# Altium footprint library PCB1.PcbLib: 53 footprints (part 3 of 4)
Each footprint in its own frame and in the unit in brackets; x right, y up, seen from the top. Pads: shape width x height; smd on the part's side, far side on the other; paste and mask are expansions set on the pad; w line width, h text height; cw(c..) or ccw(c..) is an arc to the next point about the centre after c.
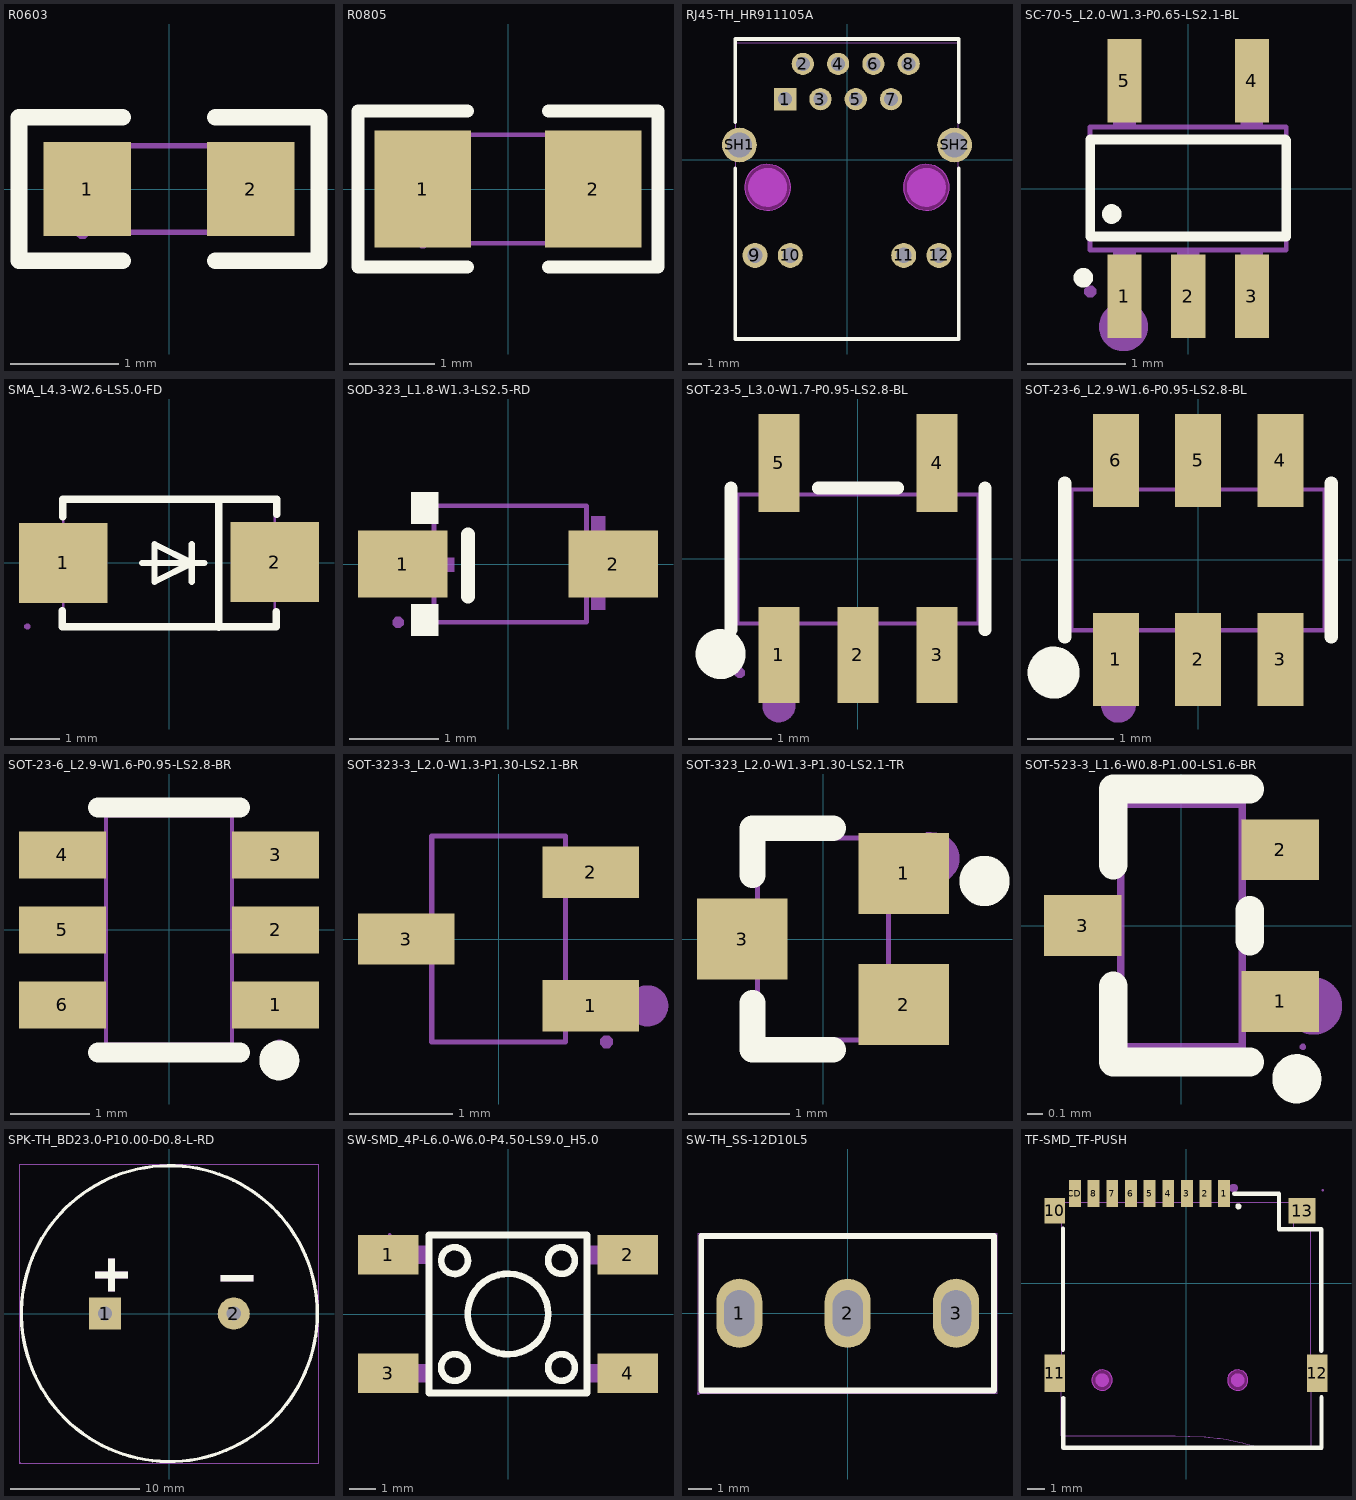
[diagram p2: the footprints below, top view; thin cyan lines are the x and y axes]

## R0603 [mm]
pads (2):
  rect 0.806x0.864 smd paste-100 mask+0.051: 1(-0.753,0) 2(0.753,0)
Top Overlay:
  lines w0.152: -0.426,-0.661 -1.385,-0.661 -1.385,0.661 -0.426,0.661 ; 0.426,-0.661 1.385,-0.661 1.385,0.661 0.426,0.661
Top Paste:
  region: -1.195,-0.45 -0.395,-0.45 -0.345,-0.4 -0.345,-0.172 -0.715,-0.172 -0.715,0.158 -0.345,0.158 -0.345,0.4 -0.395,0.45 -1.195,0.45 -1.245,0.4 -1.245,-0.4
  region: 1.195,0.45 0.395,0.45 0.345,0.4 0.345,0.172 0.715,0.172 0.715,-0.158 0.345,-0.158 0.345,-0.4 0.395,-0.45 1.195,-0.45 1.245,-0.4 1.245,0.4
Mechanical 7:
  lines w0.051: -0.8,-0.4 0.8,-0.4 0.8,0.4 -0.8,0.4 -0.8,-0.4
Mechanical 8:
  region: -0.74,-0.4 -0.74,-0.425 -0.775,-0.46 -0.825,-0.46 -0.86,-0.425 -0.86,-0.4 -0.86,-0.375 -0.825,-0.34 -0.775,-0.34 -0.74,-0.375 -0.74,-0.4
Mechanical 9:
  region: 0.8,-0.4 0.8,0.4 0.5,0.4 0.5,-0.4
  region: -0.8,-0.4 -0.8,0.4 -0.5,0.4 -0.5,-0.4
3D body "C2933128.step": height 0.44, standoff -0.01, extent -0.81,-0.41 0.81,0.4

## R0805 [mm]
pads (2):
  rect 1.133x1.377 smd paste-100 mask+0.051: 1(-1,0) 2(1,0)
Top Overlay:
  lines w0.152: -0.476,-0.917 -1.761,-0.917 -1.761,0.917 -0.476,0.917 ; 0.476,-0.917 1.761,-0.917 1.761,0.917 0.476,0.917
Top Paste:
  region: -1.7,-0.64 -1.7,0.64 -1.65,0.69 -0.5,0.69 -0.45,0.64 -0.445,0.23 -0.895,0.23 -0.895,-0.22 -0.455,-0.22 -0.45,-0.64 -0.5,-0.69 -1.65,-0.69
  region: 0.45,-0.64 0.45,-0.22 0.895,-0.22 0.895,0.23 0.455,0.23 0.45,0.64 0.5,0.69 1.65,0.69 1.7,0.64 1.7,-0.64 1.65,-0.69 0.5,-0.69
Mechanical 7:
  lines w0.051: -1,-0.637 -1,0.637 1,0.637 1,-0.637 -1,-0.637
Mechanical 8:
  region: -0.94,-0.638 -0.94,-0.662 -0.975,-0.698 -1.025,-0.698 -1.06,-0.662 -1.06,-0.638 -1.06,-0.613 -1.025,-0.578 -0.975,-0.578 -0.94,-0.613 -0.94,-0.638
Mechanical 9:
  region: -1,-0.637 -1,0.637 -0.6,0.637 -0.6,-0.637
  region: 1,-0.637 1,0.637 0.6,0.637 0.6,-0.637
3D body "C51934133.step": height 0.61, standoff 0, extent -0.96,-0.632 1.04,0.669

## RJ45-TH_HR911105A [mm]
pads (14):
  rect 1.6x1.6 hole 1: 1(-4.45,4.355)
  round 1.6 hole 1: 2(-3.18,6.895) 3(-1.91,4.355) 4(-0.64,6.895) 5(0.63,4.355) 6(1.9,6.895) 7(3.17,4.355) 8(4.44,6.895)
  round 1.8 hole 1.1: 9(-6.625,-6.895) 10(-4.085,-6.895) 11(4.085,-6.895) 12(6.625,-6.895)
  round 2.5 hole 1.8: SH1(-7.745,1.055) SH2(7.745,1.055)
Top Overlay:
  lines w0.254: -8.05,-0.615 -8.05,-12.915 8.05,-12.915 8.05,-0.615 ; -8.05,2.685 -8.05,8.685 8.05,8.685 ; 8.05,2.685 8.05,8.685
Keep-Out Layer:
  board cut-out: -7.365,-1.995 -7.365,-1.833 -7.302,-1.514 -7.177,-1.213 -6.997,-0.943 -6.767,-0.713 -6.497,-0.533 -6.196,-0.408 -5.878,-0.345 -5.552,-0.345 -5.234,-0.408 -4.933,-0.533 -4.663,-0.713 -4.433,-0.943 -4.253,-1.213 -4.128,-1.514 -4.065,-1.833 -4.065,-1.995 -4.065,-2.158 -4.128,-2.476 -4.253,-2.777 -4.433,-3.047 -4.663,-3.277 -4.933,-3.457 -5.234,-3.582 -5.552,-3.645 -5.878,-3.645 -6.196,-3.582 -6.497,-3.457 -6.767,-3.277 -6.997,-3.047 -7.177,-2.777 -7.302,-2.476 -7.365,-2.158 -7.365,-1.995
  board cut-out: 4.065,-1.995 4.065,-1.833 4.128,-1.514 4.253,-1.213 4.433,-0.943 4.663,-0.713 4.933,-0.533 5.234,-0.408 5.552,-0.345 5.878,-0.345 6.196,-0.408 6.497,-0.533 6.767,-0.713 6.997,-0.943 7.177,-1.213 7.302,-1.514 7.365,-1.833 7.365,-1.995 7.365,-2.158 7.302,-2.476 7.177,-2.777 6.997,-3.047 6.767,-3.277 6.497,-3.457 6.196,-3.582 5.878,-3.645 5.552,-3.645 5.234,-3.582 4.933,-3.457 4.663,-3.277 4.433,-3.047 4.253,-2.777 4.128,-2.476 4.065,-2.158 4.065,-1.995
Keep-Out Layer:
  drawing of 6 lines, arcs and shapes, not listed
Mechanical 1:
  circle w0.003: c-5.715,-1.995 r1.65
  circle w0.003: c5.715,-1.995 r1.65
Mechanical 6:
  circle w0.2: c-5.03,4.96 r0.1
  circle w1.4: c-5.715,-1.995 r0.7
  circle w1.4: c5.715,-1.995 r0.7
Mechanical 7:
  lines w0.051: -8.02,-12.895 -8.02,8.405 8.02,8.405 8.02,-12.895 -8.02,-12.895
Mechanical 8:
  region: -8.08,8.405 -8.08,8.43 -8.045,8.465 -7.995,8.465 -7.96,8.43 -7.96,8.405 -7.96,8.38 -7.995,8.345 -8.045,8.345 -8.08,8.38 -8.08,8.405
Mechanical 9:
  region: 4.14,7.045 4.74,7.045 4.74,6.745 4.14,6.745
  region: 2.87,4.505 3.47,4.505 3.47,4.205 2.87,4.205
  region: 1.6,7.045 2.2,7.045 2.2,6.745 1.6,6.745
  region: 0.33,4.505 0.93,4.505 0.93,4.205 0.33,4.205
  region: -0.94,7.045 -0.34,7.045 -0.34,6.745 -0.94,6.745
  region: -2.21,4.505 -1.61,4.505 -1.61,4.205 -2.21,4.205
  region: -3.48,7.045 -2.88,7.045 -2.88,6.745 -3.48,6.745
  region: -4.75,4.505 -4.15,4.505 -4.15,4.205 -4.75,4.205
  region: -6.925,-6.745 -6.325,-6.745 -6.325,-7.045 -6.925,-7.045
  region: -4.385,-6.745 -3.785,-6.745 -3.785,-7.045 -4.385,-7.045
  region: 3.785,-6.745 4.385,-6.745 4.385,-7.045 3.785,-7.045
  region: 6.325,-6.745 6.925,-6.745 6.925,-7.045 6.325,-7.045
  region: 7.72,0.455 7.72,1.655 8.02,1.655 8.02,0.455
  region: -8.02,0.455 -8.02,1.655 -7.72,1.655 -7.72,0.455
3D body "C12074.step": height 13.84, standoff -3.3, extent -7.867,-13.086 8.001,8.514

## SC-70-5_L2.0-W1.3-P0.65-LS2.1-BL [mm]
pads (5):
  rect 0.35x0.85 smd paste+0 mask+0.05: 1(-0.65,-1.1) 2(0,-1.1) 3(0.65,-1.1) 4(0.65,1.1) 5(-0.65,1.1)
Top Overlay:
  circle w0.1: c-0.78,-0.26 r0.05
  circle w0.1: c-1.07,-0.91 r0.05
  lines w0.1: -1,-0.49 -1,0.5 0.99,0.5 1,0.49 1,-0.49 -1,-0.49
Mechanical 6:
  circle w0.25: c-0.66,-1.41 r0.125
Mechanical 7:
  lines w0.051: -1,-0.625 -1,0.625 1,0.625 1,-0.625 -1,-0.625
Mechanical 8:
  region: -0.94,-1.05 -0.94,-1.075 -0.975,-1.11 -1.025,-1.11 -1.06,-1.075 -1.06,-1.05 -1.06,-1.025 -1.025,-0.99 -0.975,-0.99 -0.94,-1.025 -0.94,-1.05
Mechanical 9:
  region: 0.537,-1.05 0.537,-0.69 0.762,-0.69 0.762,-1.05
  region: -0.113,-1.05 -0.113,-0.69 0.112,-0.69 0.112,-1.05
  region: -0.763,-1.05 -0.763,-0.69 -0.538,-0.69 -0.538,-1.05
  region: 0.537,0.69 0.537,1.05 0.762,1.05 0.762,0.69
  region: -0.763,0.69 -0.763,1.05 -0.538,1.05 -0.538,0.69
Mechanical 10:
  region: 0.537,-0.7 0.537,-0.615 0.762,-0.615 0.762,-0.7
  region: -0.113,-0.7 -0.113,-0.615 0.112,-0.615 0.112,-0.7
  region: -0.763,-0.7 -0.763,-0.615 -0.538,-0.615 -0.538,-0.7
  region: 0.537,0.615 0.537,0.7 0.762,0.7 0.762,0.615
  region: -0.763,0.615 -0.763,0.7 -0.538,0.7 -0.538,0.615
3D body "C193688.step": height 0.88, standoff -0.07, extent -1,-1.1 1,1.1

## SMA_L4.3-W2.6-LS5.0-FD [mm]
pads (2):
  rect 1.8x1.62 smd: 1(-2.15,-0.009) 2(2.15,0.009)
Top Overlay:
  lines w0.127: -0.551,-0.01 0.719,-0.01 ; 0.465,-0.391 0.465,-0.01 ; 0.465,0.371 0.465,-0.01 ; 0.465,-0.01 -0.297,-0.391 -0.297,-0.01 -0.297,0.371 0.465,-0.01
  lines w0.152: -2.17,-0.979 -2.17,-1.309 2.177,-1.309 2.177,-0.998 ; -2.16,0.93 -2.16,1.288 2.186,1.288 2.186,0.977 ; 1.007,-1.321 1.007,1.276
Mechanical 6:
  region: -2.142,0.644 -2.142,-0.644 -1.949,-0.644 -1.949,0.644
  region: -2.432,0.097 -2.432,-0.097 -1.659,-0.097 -1.659,0.097
  region: 2.432,0.097 2.432,-0.097 1.659,-0.097 1.659,0.097
Mechanical 7:
  lines w0.051: -2.15,-1.3 -2.15,1.3 2.15,1.3 2.15,-1.3 -2.15,-1.3
Mechanical 8:
  region: -2.819,-1.3 -2.819,-1.325 -2.854,-1.36 -2.904,-1.36 -2.939,-1.325 -2.939,-1.3 -2.939,-1.275 -2.904,-1.24 -2.854,-1.24 -2.819,-1.275 -2.819,-1.3
Mechanical 9:
  region: 2.5,0.734 2.5,-0.716 1.35,-0.716 1.35,0.734
  region: -2.5,-0.734 -2.5,0.716 -1.35,0.716 -1.35,-0.734
3D body "C7420369.step": height 1.76, standoff -0.34, extent -2.52,-1.315 2.52,1.315

## SOD-323_L1.8-W1.3-LS2.5-RD [mm]
pads (2):
  rect 1x0.75 smd paste+0 mask+0.051: 1(-1.173,0) 2(1.173,0)
Top Overlay:
  region: -0.775,-0.802 -0.775,-0.45 -1.08,-0.45 -1.08,-0.802
  region: -0.775,0.802 -0.775,0.45 -1.08,0.45 -1.08,0.802
  lines w0.152: -0.447,-0.366 -0.447,0.331
Mechanical 6:
  region: 1.083,0.53 1.083,-0.51 0.927,-0.51 0.927,0.53
  region: 1.315,0.09 1.315,-0.066 0.691,-0.066 0.691,0.09
  region: -1.225,0.07 -1.225,-0.086 -0.601,-0.086 -0.601,0.07
Mechanical 7:
  lines w0.051: -0.825,-0.65 -0.825,0.65 0.875,0.65 0.875,-0.65 -0.825,-0.65
Mechanical 8:
  region: -1.165,-0.65 -1.165,-0.675 -1.2,-0.71 -1.25,-0.71 -1.285,-0.675 -1.285,-0.65 -1.285,-0.625 -1.25,-0.59 -1.2,-0.59 -1.165,-0.625 -1.165,-0.65
Mechanical 9:
  region: -0.925,0.16 -0.925,-0.16 -1.225,-0.16 -1.225,0.16
  region: 1.275,0.16 1.275,-0.16 0.975,-0.16 0.975,0.16
Mechanical 10:
  region: -0.815,0.16 -0.815,-0.16 -0.935,-0.16 -0.935,0.16
  region: 0.985,0.16 0.985,-0.16 0.865,-0.16 0.865,0.16
3D body "C22624.step": height 0.95, standoff 0, extent -1.452,-0.65 1.198,0.65

## SOT-23-5_L3.0-W1.7-P0.95-LS2.8-BL [mm]
pads (5):
  rect 0.49x1.157 smd: 1(-0.95,-1.154) 2(0,-1.154) 3(0.95,-1.154)
  rect 0.49x1.175 smd: 4(0.95,1.154) 5(-0.95,1.154)
Top Overlay:
  circle w0.3: c-1.651,-1.143 r0.15
  lines w0.152: -1.526,-0.851 -1.526,0.851 ; -0.476,0.851 0.476,0.851 ; 1.526,-0.851 1.526,0.851
Mechanical 6:
  circle w0.2: c-0.95,-1.763 r0.1
Mechanical 7:
  lines w0.051: -1.45,-0.775 1.45,-0.775 1.45,0.775 -1.45,0.775 -1.45,-0.775
Mechanical 8:
  region: -1.36,-1.37 -1.36,-1.395 -1.395,-1.43 -1.445,-1.43 -1.48,-1.395 -1.48,-1.37 -1.48,-1.345 -1.445,-1.31 -1.395,-1.31 -1.36,-1.345 -1.36,-1.37
Mechanical 9:
  region: -1.125,1 -1.125,1.4 -0.775,1.4 -0.775,1
  region: 0.775,1 0.775,1.4 1.125,1.4 1.125,1
  region: 0.775,-1.4 0.775,-1 1.125,-1 1.125,-1.4
  region: -0.175,-1.4 -0.175,-1 0.175,-1 0.175,-1.4
  region: -1.125,-1.4 -1.125,-1 -0.775,-1 -0.775,-1.4
Mechanical 10:
  region: -1.125,0.74 -1.125,1.01 -0.775,1.01 -0.775,0.74
  region: 0.775,0.74 0.775,1.01 1.125,1.01 1.125,0.74
  region: 0.775,-1.01 0.775,-0.74 1.125,-0.74 1.125,-1.01
  region: -0.175,-1.01 -0.175,-0.74 0.175,-0.74 0.175,-1.01
  region: -1.125,-1.01 -1.125,-0.74 -0.775,-0.74 -0.775,-1.01
3D body "C55136.step": height 1.2, standoff -0.05, extent -1.45,-1.506 1.45,1.506

## SOT-23-6_L2.9-W1.6-P0.95-LS2.8-BL [mm]
pads (6):
  rect 0.532x1.072 smd: 1(-0.95,-1.149) 2(0,-1.149) 3(0.95,-1.149) 4(0.95,1.149) 5(0,1.149) 6(-0.95,1.149)
Top Overlay:
  circle w0.3: c-1.668,-1.301 r0.15
  lines w0.152: -1.539,-0.889 -1.539,0.889 ; 1.539,-0.889 1.539,0.889
Mechanical 6:
  circle w0.2: c-0.92,-1.68 r0.1
Mechanical 7:
  lines w0.051: -1.463,-0.813 -1.463,0.813 1.463,0.813 1.463,-0.813 -1.463,-0.813
Mechanical 8:
  region: -1.403,-1.4 -1.403,-1.425 -1.438,-1.46 -1.488,-1.46 -1.523,-1.425 -1.523,-1.4 -1.523,-1.375 -1.488,-1.34 -1.438,-1.34 -1.403,-1.375 -1.403,-1.4
Mechanical 9:
  region: -1.165,0.925 -0.735,0.925 -0.735,1.4 -1.165,1.4
  region: -0.215,0.925 0.215,0.925 0.215,1.4 -0.215,1.4
  region: 0.735,0.925 1.165,0.925 1.165,1.4 0.735,1.4
  region: 0.735,-0.925 1.165,-0.925 1.165,-1.4 0.735,-1.4
  region: -0.215,-0.925 0.215,-0.925 0.215,-1.4 -0.215,-1.4
  region: -1.165,-0.925 -0.735,-0.925 -0.735,-1.4 -1.165,-1.4
Mechanical 10:
  region: -1.165,0.935 -0.735,0.935 -0.735,0.803 -1.165,0.803
  region: -0.215,0.935 0.215,0.935 0.215,0.803 -0.215,0.803
  region: 0.735,0.935 1.165,0.935 1.165,0.803 0.735,0.803
  region: 0.735,-0.803 1.165,-0.803 1.165,-0.935 0.735,-0.935
  region: -0.215,-0.803 0.215,-0.803 0.215,-0.935 -0.215,-0.935
  region: -1.165,-0.803 -0.735,-0.803 -0.735,-0.935 -1.165,-0.935
3D body "C311983.step": height 1.6, standoff -0.05, extent -1.45,-1.406 1.45,1.406

## SOT-23-6_L2.9-W1.6-P0.95-LS2.8-BR [mm]
pads (6):
  rect 1.1x0.6 smd paste+0 mask+0.051: 1(1.35,-0.95) 2(1.35,0) 3(1.35,0.95) 4(-1.35,0.95) 5(-1.35,0) 6(-1.35,-0.95)
Top Overlay:
  circle w0.254: c1.397,-1.651 r0.127
  lines w0.254: -0.9,-1.55 0.9,-1.55 ; -0.9,1.55 0.9,1.55
Mechanical 6:
  circle w0.2: c1.4,-0.95 r0.1
Mechanical 7:
  lines w0.051: -0.8,-1.45 -0.8,1.45 0.8,1.45 0.8,-1.45 -0.8,-1.45
Mechanical 8:
  region: 1.46,-1.45 1.46,-1.475 1.425,-1.51 1.375,-1.51 1.34,-1.475 1.34,-1.45 1.34,-1.425 1.375,-1.39 1.425,-1.39 1.46,-1.425 1.46,-1.45
Mechanical 9:
  region: -0.925,-1.165 -0.925,-0.735 -1.4,-0.735 -1.4,-1.165
  region: -0.925,-0.215 -0.925,0.215 -1.4,0.215 -1.4,-0.215
  region: -0.925,0.735 -0.925,1.165 -1.4,1.165 -1.4,0.735
  region: 0.925,0.735 0.925,1.165 1.4,1.165 1.4,0.735
  region: 0.925,-0.215 0.925,0.215 1.4,0.215 1.4,-0.215
  region: 0.925,-1.165 0.925,-0.735 1.4,-0.735 1.4,-1.165
Mechanical 10:
  region: -0.935,0.735 -0.935,1.165 -0.79,1.165 -0.79,0.735
  region: -0.935,-0.215 -0.935,0.215 -0.79,0.215 -0.79,-0.215
  region: -0.935,-1.165 -0.935,-0.735 -0.79,-0.735 -0.79,-1.165
  region: 0.935,-0.735 0.935,-1.165 0.79,-1.165 0.79,-0.735
  region: 0.935,0.215 0.935,-0.215 0.79,-0.215 0.79,0.215
  region: 0.935,1.165 0.935,0.735 0.79,0.735 0.79,1.165
3D body "C5818961.step": height 1.6, standoff -0.05, extent -1.406,-1.45 1.406,1.45

## SOT-323-3_L2.0-W1.3-P1.30-LS2.1-BR [mm]
pads (3):
  rect 0.936x0.5 smd paste+0 mask+0.051: 1(0.898,-0.65) 2(0.898,0.65) 3(-0.898,0)
Mechanical 6:
  circle w0.2: c1.45,-0.65 r0.1
Mechanical 7:
  lines w0.051: -0.65,-1 0.65,-1 0.65,1 -0.65,1 -0.65,-1
Mechanical 8:
  region: 1.11,-1 1.11,-1.025 1.075,-1.06 1.025,-1.06 0.99,-1.025 0.99,-1 0.99,-0.975 1.025,-0.94 1.075,-0.94 1.11,-0.975 1.11,-1
Mechanical 9:
  region: 0.75,-0.825 0.75,-0.475 1.05,-0.475 1.05,-0.825
  region: 0.75,0.475 0.75,0.825 1.05,0.825 1.05,0.475
  region: -1.05,-0.175 -1.05,0.175 -0.75,0.175 -0.75,-0.175
Mechanical 10:
  region: 0.64,-0.825 0.64,-0.475 0.76,-0.475 0.76,-0.825
  region: 0.64,0.475 0.64,0.825 0.76,0.825 0.76,0.475
  region: -0.76,-0.175 -0.76,0.175 -0.64,0.175 -0.64,-0.175
3D body "C113315.step": height 1.1, standoff -0.08, extent -1.05,-1 1.05,1

## SOT-323_L2.0-W1.3-P1.30-LS2.1-TR [mm]
pads (3):
  rect 0.9x0.8 smd: 1(0.8,0.65) 2(0.8,-0.65) 3(-0.8,0)
Top Overlay:
  lines w0.249: 1.6,0.7 ccw(c1.601,0.576) 1.603,0.7
  lines w0.254: -0.7,-0.631 -0.7,-1.1 0.1,-1.1 ; -0.7,0.631 -0.7,1.1 0.1,1.1
Mechanical 6:
  circle w0.254: c1.1,0.8 r0.127
Mechanical 7:
  lines w0.051: -0.65,-1 0.65,-1 0.65,1 -0.65,1 -0.65,-1
Mechanical 8:
  region: 1.11,1 1.11,0.975 1.075,0.94 1.025,0.94 0.99,0.975 0.99,1 0.99,1.025 1.025,1.06 1.075,1.06 1.11,1.025 1.11,1
Mechanical 9:
  region: 0.65,0.5 0.65,0.8 1.05,0.8 1.05,0.5
  region: -1.05,-0.15 -1.05,0.15 -0.65,0.15 -0.65,-0.15
  region: 0.65,-0.8 0.65,-0.5 1.05,-0.5 1.05,-0.8
Mechanical 10:
  region: 0.64,0.5 0.64,0.8 0.66,0.8 0.66,0.5
  region: -0.66,-0.15 -0.66,0.15 -0.64,0.15 -0.64,-0.15
  region: 0.64,-0.8 0.64,-0.5 0.66,-0.5 0.66,-0.8
3D body "C113315.step": height 1.1, standoff -0.08, extent -1.05,-1 1.05,1

## SOT-523-3_L1.6-W0.8-P1.00-LS1.6-BR [mm]
pads (3):
  rect 0.51x0.4 smd: 1(0.65,-0.5) 2(0.65,0.5) 3(-0.65,0)
Top Overlay:
  circle w0.19: c0.76,-1.01 r0.067
  lines w0.19: -0.45,-0.399 -0.45,-0.9 0.45,-0.9 0.45,-0.899 ; -0.45,0.399 -0.45,0.9 0.45,0.9 0.45,0.899 ; 0.45,-0.101 0.45,0.101
Mechanical 6:
  circle w0.19: c0.87,-0.53 r0.094
Mechanical 7:
  lines w0.051: -0.4,-0.8 -0.4,0.8 0.4,0.8 0.4,-0.8 -0.4,-0.8
Mechanical 8:
  region: 0.82,-0.8 0.82,-0.808 0.808,-0.82 0.792,-0.82 0.78,-0.808 0.78,-0.8 0.78,-0.792 0.792,-0.78 0.808,-0.78 0.82,-0.792 0.82,-0.8
Mechanical 9:
  region: -0.8,-0.1 -0.8,0.1 -0.44,0.1 -0.44,-0.1
  region: 0.44,-0.6 0.44,-0.4 0.8,-0.4 0.8,-0.6
  region: 0.44,0.4 0.44,0.6 0.8,0.6 0.8,0.4
Mechanical 10:
  region: -0.45,-0.1 -0.45,0.1 -0.39,0.1 -0.39,-0.1
  region: 0.39,-0.6 0.39,-0.4 0.45,-0.4 0.45,-0.6
  region: 0.39,0.4 0.39,0.6 0.45,0.6 0.45,0.4
3D body "C725562.step": height 1, standoff -0.15, extent -0.806,-0.8 0.806,0.8

## SPK-TH_BD23.0-P10.00-D0.8-L-RD [mm]
pads (2):
  rect 2.5x2.5 hole 1.1: 1(-5,0)
  round 2.5 hole 1.1: 2(5,0)
Top Overlay:
  circle w0.254: c0,0 r11.5
  region: -5.75,3.25 -3.25,3.25 -3.25,2.75 -5.75,2.75
  region: -4.75,1.75 -4.75,4.25 -4.25,4.25 -4.25,1.75
  region: 4,3 6.5,3 6.5,2.5 4,2.5
Mechanical 6:
  region: -5.75,3.25 -3.25,3.25 -3.25,2.75 -5.75,2.75
  region: -4.75,1.75 -4.75,4.25 -4.25,4.25 -4.25,1.75
  region: 4,3 6.5,3 6.5,2.5 4,2.5
Mechanical 7:
  lines w0.051: -11.627,-11.627 -11.627,11.627 11.627,11.627 11.627,-11.627 -11.627,-11.627
Mechanical 8:
  region: -11.567,-11.627 -11.567,-11.652 -11.602,-11.687 -11.652,-11.687 -11.687,-11.652 -11.687,-11.627 -11.687,-11.602 -11.652,-11.567 -11.602,-11.567 -11.567,-11.602 -11.567,-11.627
Mechanical 9:
  region: 5.45,0 5.45,-0.09 5.381,-0.255 5.255,-0.382 5.089,-0.45 4.91,-0.45 4.745,-0.382 4.618,-0.255 4.55,-0.09 4.55,0 4.55,0.09 4.618,0.255 4.745,0.382 4.91,0.45 5.089,0.45 5.255,0.382 5.381,0.255 5.45,0.09 5.45,0
  region: -4.55,0 -4.55,-0.09 -4.618,-0.255 -4.745,-0.382 -4.91,-0.45 -5.09,-0.45 -5.255,-0.382 -5.382,-0.255 -5.45,-0.09 -5.45,0 -5.45,0.09 -5.382,0.255 -5.255,0.382 -5.09,0.45 -4.91,0.45 -4.745,0.382 -4.618,0.255 -4.55,0.09 -4.55,0
3D body "C530531.step": height 8.01, standoff -6, extent -11.5,-11.5 11.5,11.5

## SW-SMD_4P-L6.0-W6.0-P4.50-LS9.0_H5.0 [mm]
pads (4):
  rect 2.3x1.5 smd: 1(-4.55,2.25) 2(4.55,2.25) 3(-4.55,-2.25) 4(4.55,-2.25)
Top Overlay:
  circle w0.254: c-2.03,2.03 r0.508
  circle w0.254: c2.032,2.032 r0.508
  circle w0.254: c-2.032,-2.032 r0.508
  circle w0.254: c2.032,-2.032 r0.508
  circle w0.254: c0,0 r1.529
  lines w0.254: -3,-3 -3,3 3,3 3,-3 -3,-3
Mechanical 7:
  lines w0.051: -3,-3 -3,3 3,3 3,-3 -3,-3
Mechanical 8:
  region: -4.44,3 -4.44,2.975 -4.475,2.94 -4.525,2.94 -4.56,2.975 -4.56,3 -4.56,3.025 -4.525,3.06 -4.475,3.06 -4.44,3.025 -4.44,3
Mechanical 9:
  region: 3.5,1.9 3.5,2.6 4.5,2.6 4.5,1.9
  region: 3.5,-2.6 3.5,-1.9 4.5,-1.9 4.5,-2.6
  region: -4.5,-2.6 -4.5,-1.9 -3.5,-1.9 -3.5,-2.6
  region: -4.5,1.9 -4.5,2.6 -3.5,2.6 -3.5,1.9
Mechanical 10:
  region: 2.99,1.9 2.99,2.6 3.51,2.6 3.51,1.9
  region: 2.99,-2.6 2.99,-1.9 3.51,-1.9 3.51,-2.6
  region: -3.51,-2.6 -3.51,-1.9 -2.99,-1.9 -2.99,-2.6
  region: -3.51,1.9 -3.51,2.6 -2.99,2.6 -2.99,1.9
3D body "C2837531.step": height 4.75, standoff -0.25, extent -4.5,-3.001 4.5,3

## SW-TH_SS-12D10L5 [mm]
pads (3):
  oval 2x3 hole 1.3 slot 2 at 90 deg: 1(-4.7,0) 2(0,0) 3(4.7,0)
Top Overlay:
  lines w0.254: -6.35,-3.35 -6.35,3.35 6.35,3.35 6.35,-3.35 -6.35,-3.35
Mechanical 7:
  lines w0.051: -6.477,-3.477 -6.477,3.477 6.477,3.477 6.477,-3.477 -6.477,-3.477
Mechanical 8:
  region: -6.417,-3.477 -6.417,-3.502 -6.452,-3.537 -6.502,-3.537 -6.537,-3.502 -6.537,-3.477 -6.537,-3.452 -6.502,-3.417 -6.452,-3.417 -6.417,-3.452 -6.417,-3.477
Mechanical 9:
  region: -5.1,0.65 -4.3,0.65 -4.3,-0.65 -5.1,-0.65
  region: -0.4,0.65 0.4,0.65 0.4,-0.65 -0.4,-0.65
  region: 4.3,0.65 5.1,0.65 5.1,-0.65 4.3,-0.65
3D body "C319012.step": height 11.4, standoff -6.9, extent -6.5,-3.4 6.5,3.4

## TF-SMD_TF-PUSH [mm]
pads (13):
  rect 0.7x1.6 smd: 1(2.25,5.3) 2(1.15,5.3) 3(0.05,5.3) 4(-1.05,5.3) 5(-2.15,5.3) 6(-3.25,5.3) 7(-4.35,5.3) 8(-5.45,5.3) CD(-6.55,5.3)
  rect 1.2x1.5 smd: 10(-7.75,4.3)
  rect 1.2x2.2 smd: 11(-7.75,-5.3) 12(7.75,-5.3)
  rect 1.6x1.5 smd: 13(6.85,4.3)
Top Overlay:
  circle w0.254: c3.087,4.552 r0.052
  lines w0.254: -7.26,-3.91 -7.26,3.25 ; -7.24,-6.76 -7.24,-9.7 8,-9.7 8,-6.71 ; 2.85,5.3 4.702,5.3 5.489,5.3 5.489,3.199 5.5,3.2 ; 5.49,3.2 7.98,3.2 7.98,-3.969
Keep-Out Layer:
  board cut-out: 3.65,-5.7 3.65,-5.819 3.559,-6.04 3.39,-6.209 3.169,-6.3 2.931,-6.3 2.71,-6.209 2.541,-6.04 2.45,-5.819 2.45,-5.7 2.45,-5.581 2.541,-5.36 2.71,-5.191 2.931,-5.1 3.169,-5.1 3.39,-5.191 3.559,-5.36 3.65,-5.581 3.65,-5.7
  board cut-out: -4.35,-5.7 -4.35,-5.819 -4.441,-6.04 -4.61,-6.209 -4.831,-6.3 -5.069,-6.3 -5.29,-6.209 -5.459,-6.04 -5.55,-5.819 -5.55,-5.7 -5.55,-5.581 -5.459,-5.36 -5.29,-5.191 -5.069,-5.1 -4.831,-5.1 -4.61,-5.191 -4.441,-5.36 -4.35,-5.581 -4.35,-5.7
Keep-Out Layer:
  circle w0.003: c3.05,-5.7 r0.6
  circle w0.003: c-4.95,-5.7 r0.6
  region: 3.65,-5.7 3.641,-5.804 3.614,-5.905 3.57,-6 3.51,-6.086 3.436,-6.16 3.35,-6.22 3.255,-6.264 3.154,-6.291 3.05,-6.3 2.946,-6.291 2.845,-6.264 2.75,-6.22 2.664,-6.16 2.59,-6.086 2.53,-6 2.486,-5.905 2.459,-5.804 2.45,-5.7 2.459,-5.596 2.486,-5.495 2.53,-5.4 2.59,-5.314 2.664,-5.24 2.75,-5.18 2.845,-5.136 2.946,-5.109 3.05,-5.1 3.154,-5.109 3.255,-5.136 3.35,-5.18 3.436,-5.24 3.51,-5.314 3.57,-5.4 3.614,-5.495 3.641,-5.596
  region: 3.65,-5.7 3.65,-5.819 3.559,-6.04 3.39,-6.209 3.169,-6.3 2.931,-6.3 2.71,-6.209 2.541,-6.04 2.45,-5.819 2.45,-5.7 2.45,-5.581 2.541,-5.36 2.71,-5.191 2.931,-5.1 3.169,-5.1 3.39,-5.191 3.559,-5.36 3.65,-5.581 3.65,-5.7
  region: -4.35,-5.7 -4.359,-5.804 -4.386,-5.905 -4.43,-6 -4.49,-6.086 -4.564,-6.16 -4.65,-6.22 -4.745,-6.264 -4.846,-6.291 -4.95,-6.3 -5.054,-6.291 -5.155,-6.264 -5.25,-6.22 -5.336,-6.16 -5.41,-6.086 -5.47,-6 -5.514,-5.905 -5.541,-5.804 -5.55,-5.7 -5.541,-5.596 -5.514,-5.495 -5.47,-5.4 -5.41,-5.314 -5.336,-5.24 -5.25,-5.18 -5.155,-5.136 -5.054,-5.109 -4.95,-5.1 -4.846,-5.109 -4.745,-5.136 -4.65,-5.18 -4.564,-5.24 -4.49,-5.314 -4.43,-5.4 -4.386,-5.495 -4.359,-5.596
  region: -4.35,-5.7 -4.35,-5.819 -4.441,-6.04 -4.61,-6.209 -4.831,-6.3 -5.069,-6.3 -5.29,-6.209 -5.459,-6.04 -5.55,-5.819 -5.55,-5.7 -5.55,-5.581 -5.459,-5.36 -5.29,-5.191 -5.069,-5.1 -4.831,-5.1 -4.61,-5.191 -4.441,-5.36 -4.35,-5.581 -4.35,-5.7
Mechanical 1:
  circle w0.003: c3.05,-5.7 r0.6
  circle w0.003: c-4.95,-5.7 r0.6
Mechanical 6:
  circle w0.254: c2.81,5.63 r0.127
  circle w0.4: c-4.95,-5.7 r0.2
  circle w0.4: c3.05,-5.7 r0.2
Mechanical 7:
  lines w0.051: -8.07,4.806 7.181,4.806 ; -8.07,4.806 -8.07,4.806 ; -8.07,4.806 -8.07,3.806 -7.37,3.806 -7.37,-4.494 -8.07,-4.494 -8.07,-6.094 -7.37,-6.094 -7.37,-8.994 -6.352,-8.995 -2.476,-8.986 -1.695,-8.99 -0.648,-8.989 0.138,-8.999 0.232,-9.003 1.09,-9.042 1.163,-9.05 1.308,-9.069 1.414,-9.075 1.841,-9.121 2.012,-9.136 2.38,-9.204 3.048,-9.34 3.176,-9.371 3.348,-9.403 3.411,-9.421 3.876,-9.552 4.14,-9.628 4.388,-9.695 4.389,-9.694 7.379,-9.694 7.38,-9.693 7.38,-6.094 8.07,-6.094 ; 7.181,4.806 7.181,3.806 7.181,3.806 6.33,3.806 6.33,3.306 7.229,3.306 7.229,3.206 7.37,3.206 7.37,-4.494 7.37,-4.494 8.069,-4.494 8.07,-4.495 8.07,-6.094 ; 7.181,4.806 7.181,4.806 ; 8.07,-6.094 8.07,-6.094
Mechanical 8:
  region: 8.13,5.505 8.13,5.48 8.095,5.445 8.045,5.445 8.01,5.48 8.01,5.505 8.01,5.53 8.045,5.565 8.095,5.565 8.13,5.53 8.13,5.505
Mechanical 9:
  region: 8.069,-6.092 8.068,-4.492 7.369,-4.492 7.369,-6.091 7.429,-6.091
  region: -7.369,-6.094 -7.37,-4.494 -8.069,-4.494 -8.069,-6.094 -8.009,-6.094
  region: 6.481,3.805 7.181,3.805 7.181,4.805 6.494,4.805 6.469,4.806 6.472,4.752 6.473,4.671 6.474,4.498
  region: -7.37,3.806 -8.069,3.806 -8.07,4.806 -7.383,4.806 -7.382,4.805 -7.384,4.498
  region: 2.1,5.505 2.4,5.505 2.4,4.805 2.1,4.805
  region: 1,5.505 1.3,5.505 1.3,4.805 1,4.805
  region: -0.1,5.505 0.2,5.505 0.2,4.805 -0.1,4.805
  region: -1.2,5.505 -0.9,5.505 -0.9,4.805 -1.2,4.805
  region: -2.3,5.505 -2,5.505 -2,4.805 -2.3,4.805
  region: -3.4,5.505 -3.1,5.505 -3.1,4.805 -3.4,4.805
  region: -4.5,5.505 -4.2,5.505 -4.2,4.805 -4.5,4.805
  region: -5.6,5.505 -5.3,5.505 -5.3,4.805 -5.6,4.805
  region: -6.7,5.505 -6.4,5.505 -6.4,4.805 -6.7,4.805
3D body "C393941.step": height 2.05, standoff -0.6, extent -8.075,-9.79 8.075,5.41